# Altium footprint library VQFN-16-1EP_3x3mm_P0.5mm_EP1.68x1.68mm.PcbLib: 1 footprints
Each footprint in its own frame and in the unit in brackets; x right, y up, seen from the top. Pads: shape width x height; smd on the part's side, far side on the other; paste and mask are expansions set on the pad; w line width, h text height; cw(c..) or ccw(c..) is an arc to the next point about the centre after c.
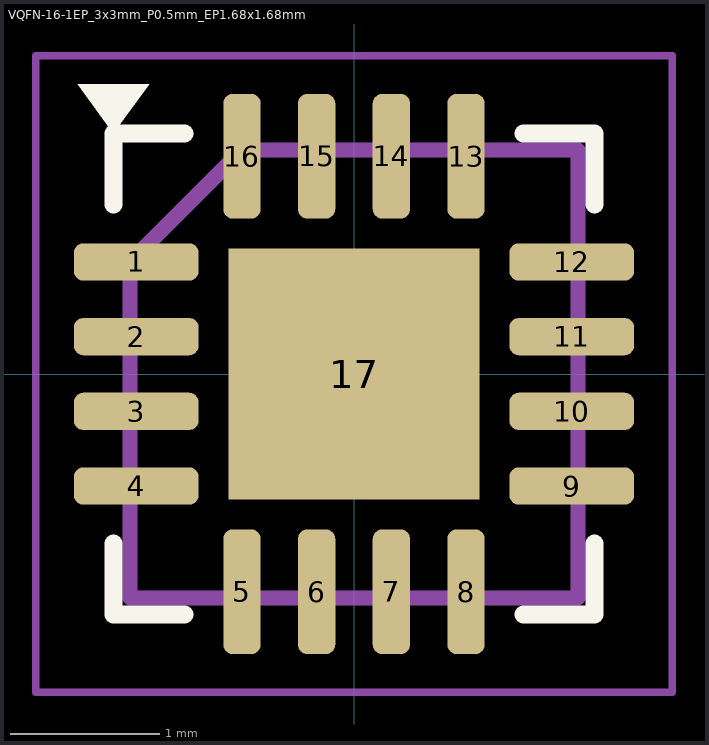
[diagram p0: the footprint, top view; thin cyan lines are the x and y axes]

## VQFN-16-1EP_3x3mm_P0.5mm_EP1.68x1.68mm [mm] "VQFN-16 3x3 mm (TI RGT, e.g. TPS62133RGTR); IPC-7351B qfn density B; generated by ecadlib"
height 1
pads (17):
  rrect50% 0.835x0.25 smd: 1(-1.458,0.75) 2(-1.458,0.25) 3(-1.458,-0.25) 4(-1.458,-0.75) 9(1.458,-0.75) 10(1.458,-0.25) 11(1.458,0.25) 12(1.458,0.75)
  rrect50% 0.25x0.835 smd: 5(-0.75,-1.458) 6(-0.25,-1.458) 7(0.25,-1.458) 8(0.75,-1.458) 13(0.75,1.458) 14(0.25,1.458) 15(-0.25,1.458) 16(-0.75,1.458)
  rect 1.68x1.68 smd paste-0.85: 17(0,0)
Top Overlay:
  region: -1.61,1.61 -1.85,1.94 -1.37,1.94
  lines w0.12: -1.61,-1.135 -1.61,-1.61 -1.135,-1.61 ; -1.61,1.135 -1.61,1.61 -1.135,1.61 ; 1.135,-1.61 1.61,-1.61 1.61,-1.135 ; 1.135,1.61 1.61,1.61 1.61,1.135
  text ".Designator" at -1.391,2.33 h1
Top Paste:
  rectangle: -0.758,0.082 -0.082,0.758
  rectangle: -0.758,-0.758 -0.082,-0.082
  rectangle: 0.082,0.082 0.758,0.758
  rectangle: 0.082,-0.758 0.758,-0.082
Mechanical 13:
  lines w0.1: -1.5,-1.5 1.5,-1.5 1.5,1.5 -0.75,1.5 -1.5,0.75 -1.5,-1.5
  text ".Comment" at -3.708,-3.33 h1
Mechanical 15:
  lines w0.05: -2.13,-2.13 2.13,-2.13 2.13,2.13 -2.13,2.13 -2.13,-2.13